# Altium footprint library Power_vac.PcbLib: 50 footprints (part 3 of 4)
Each footprint in its own frame and in the unit in brackets; x right, y up, seen from the top. Pads: shape width x height; smd on the part's side, far side on the other; paste and mask are expansions set on the pad; w line width, h text height; cw(c..) or ccw(c..) is an arc to the next point about the centre after c.
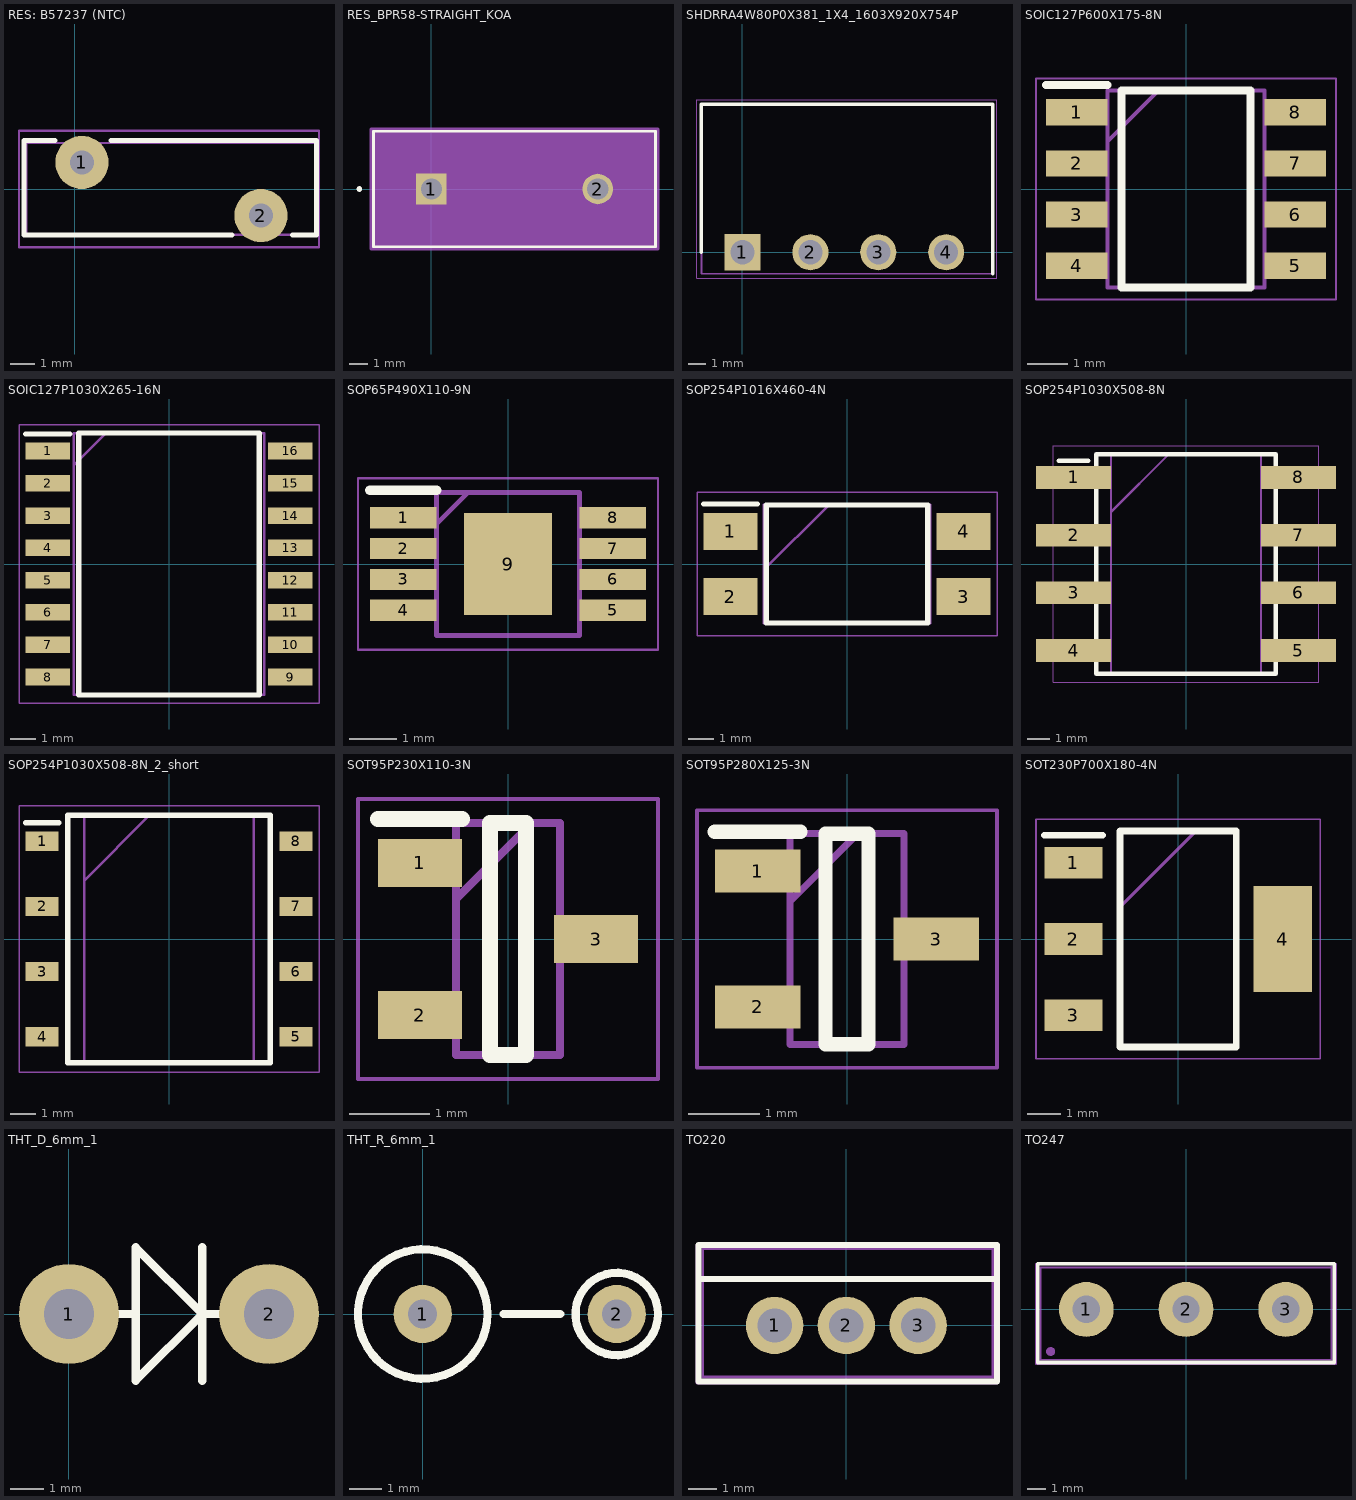
[diagram p2: the footprints below, top view; thin cyan lines are the x and y axes]

## RES: B57237 (NTC) [mm]
pads (2):
  round 2.2 hole 1: 1(0.3,1.1) 2(7.7,-1.1)
Top Overlay:
  lines w0.2: -0.8,2 -2.1,2 -2.1,-1.9 6.5,-1.9 ; 1.5,2 10,2 10,-1.9 9,-1.9
Mechanical 1:
  lines w0.1: -2,-1.9 -2,1.902 10,1.902 10,-1.9 -2,-1.9
Mechanical 15:
  lines w0.1: -2.3,-2.4 10.1,-2.4 10.1,2.4 -2.3,2.4 -2.3,-2.4
3D body "User Library-S10K275.STEP": height 13, standoff -2.5, extent -2,-1.9 10,1.902

## RES_BPR58-STRAIGHT_KOA [mil]
pads (2):
  rect 65x65 hole 45 paste-99999 mask+0: 1(0,0)
  round 65 hole 45 paste-99999 mask+0: 2(354.33,0)
Top Overlay:
  circle w6: c-153.33,0 r3
  lines w6: -123.33,-123 477.67,-123 477.67,123 -123.33,123 -123.33,-123
  text ".Designator" at 39.67,-25 h50
Mechanical 13:
  circle w1: c-98.33,0 r3
  lines w1: -118.33,-118 472.67,-118 472.67,118 -118.33,118 -118.33,-118
  text ".Designator" at 39.67,-25 h50
Mechanical 15:
  region: 482.67,-128 -128.33,-128 -128.33,128 482.67,128
  lines w6: -128.33,-128 -128.33,128 482.67,128 482.67,-128 -128.33,-128
3D body "RES_BPR58-STRAIGHT_KOA.step": height 747.99, standoff -205, extent -118.35,-117.99 472.68,117.99

## SHDRRA4W80P0X381_1X4_1603X920X754P [mm]
pads (4):
  rect 2.025x2.025 hole 1.35: 1(0,0)
  round 2.025 hole 1.35: 2(3.81,0) 3(7.62,0) 4(11.43,0)
Top Overlay:
  lines w0.2: -2.3,0 -2.3,8.3 14.03,8.3 14.03,-1.2
Mechanical 13:
  lines w0.1: -2.3,-1.2 14.03,-1.2 14.03,8.3 -2.3,8.3 -2.3,-1.2
Mechanical 15:
  lines w0.05: -2.55,-1.45 -2.55,8.55 14.28,8.55 14.28,-1.45 -2.55,-1.45
3D body "15EDGRC-3.81-04P-14-00A_H_.stp": height 7.54, standoff -3.7, extent -2.3,-1.2 13.73,8

## SOIC127P600X175-8N [mm]
pads (8):
  rect 1.525x0.65 smd: 1(-2.712,1.905) 2(-2.712,0.635) 3(-2.712,-0.635) 4(-2.712,-1.905) 5(2.712,-1.905) 6(2.712,-0.635) 7(2.712,0.635) 8(2.712,1.905)
Top Overlay:
  lines w0.2: -3.475,2.58 -1.95,2.58 ; -1.6,-2.45 -1.6,2.45 1.6,2.45 1.6,-2.45 -1.6,-2.45
Mechanical 13:
  lines w0.1: -1.95,1.18 -0.68,2.45 ; -1.95,-2.45 -1.95,2.45 1.95,2.45 1.95,-2.45 -1.95,-2.45
Mechanical 15:
  lines w0.05: -3.725,-2.75 -3.725,2.75 3.725,2.75 3.725,-2.75 -3.725,-2.75
3D body "NE555DR.stp": height 1.75, standoff 0, extent -3,-2.45 3,2.45

## SOIC127P1030X265-16N [mm]
pads (16):
  rect 1.75x0.65 smd: 1(-4.775,4.445) 2(-4.775,3.175) 3(-4.775,1.905) 4(-4.775,0.635) 5(-4.775,-0.635) 6(-4.775,-1.905) 7(-4.775,-3.175) 8(-4.775,-4.445) 9(4.775,-4.445) 10(4.775,-3.175) 11(4.775,-1.905) 12(4.775,-0.635) 13(4.775,0.635) 14(4.775,1.905) 15(4.775,3.175) 16(4.775,4.445)
Top Overlay:
  lines w0.2: -5.65,5.12 -3.9,5.12 ; -3.55,-5.15 3.55,-5.15 3.55,5.15 -3.55,5.15 -3.55,-5.15
Mechanical 13:
  lines w0.1: -3.75,3.88 -2.48,5.15 ; -3.75,-5.15 3.75,-5.15 3.75,5.15 -3.75,5.15 -3.75,-5.15
Mechanical 15:
  lines w0.05: -5.9,-5.475 5.9,-5.475 5.9,5.475 -5.9,5.475 -5.9,-5.475
3D body "SG3525A.stp": height 2.65, standoff 0, extent -5.15,-5.15 5.15,5.15

## SOP65P490X110-9N [mm]
pads (9):
  rect 1.4x0.45 smd: 1(-2.2,0.975) 2(-2.2,0.325) 3(-2.2,-0.325) 4(-2.2,-0.975) 5(2.2,-0.975) 6(2.2,-0.325) 7(2.2,0.325) 8(2.2,0.975)
  rect 1.846x2.15 smd: 9(0,0)
Top Overlay:
  lines w0.2: -2.9,1.55 -1.5,1.55
Mechanical 13:
  lines w0.1: -1.5,0.85 -0.85,1.5 ; -1.5,-1.5 1.5,-1.5 1.5,1.5 -1.5,1.5 -1.5,-1.5
Mechanical 15:
  lines w0.05: -3.15,-1.8 3.15,-1.8 3.15,1.8 -3.15,1.8 -3.15,-1.8
3D body "TPA2005D1DGN.stp": height 1.1, standoff 0, extent -2.45,-1.5 2.45,1.5

## SOP254P1016X460-4N [mm]
pads (4):
  rect 2.1x1.45 smd: 1(-4.55,1.27) 2(-4.55,-1.27) 3(4.55,-1.27) 4(4.55,1.27)
Top Overlay:
  lines w0.2: -5.6,2.345 -3.5,2.345 ; -3.15,-2.3 3.15,-2.3 3.15,2.3 -3.15,2.3 -3.15,-2.3
Mechanical 13:
  lines w0.1: -3.25,-0.24 -0.71,2.3 ; -3.25,-2.3 3.25,-2.3 3.25,2.3 -3.25,2.3 -3.25,-2.3
Mechanical 15:
  lines w0.05: -5.85,-2.8 5.85,-2.8 5.85,2.8 -5.85,2.8 -5.85,-2.8
3D body "LTV817S.stp": height 4.6, standoff 0, extent -5.08,-2.297 5.08,2.297

## SOP254P1030X508-8N [mm]
pads (8):
  rect 3.3x1 smd: 1(-4.95,3.81) 2(-4.95,1.27) 3(-4.95,-1.27) 4(-4.95,-3.81) 5(4.95,-3.81) 6(4.95,-1.27) 7(4.95,1.27) 8(4.95,3.81)
Top Overlay:
  lines w0.2: -5.6,4.535 -4.3,4.535 ; -3.95,-4.828 -3.95,4.828 3.95,4.828 3.95,-4.828 -3.95,-4.828
Mechanical 13:
  lines w0.1: -3.302,2.288 -0.762,4.828 ; -3.302,-4.828 -3.302,4.828 3.302,4.828 3.302,-4.828 -3.302,-4.828
Mechanical 15:
  lines w0.05: -5.85,-5.205 -5.85,5.205 5.85,5.205 5.85,-5.205 -5.85,-5.205
3D body "FOD3184SDV.stp": height 5.08, standoff 0, extent -5.15,-4.828 5.15,4.828

## SOP254P1030X508-8N_2_short [mm]
pads (8):
  rect 1.3x0.75 smd: 1(-4.95,3.81) 2(-4.95,1.27) 3(-4.95,-1.27) 4(-4.95,-3.81) 5(4.95,-3.81) 6(4.95,-1.27) 7(4.95,1.27) 8(4.95,3.81)
Top Overlay:
  lines w0.2: -5.6,4.535 -4.3,4.535 ; -3.95,-4.828 3.95,-4.828 3.95,4.828 -3.95,4.828 -3.95,-4.828
Mechanical 13:
  lines w0.1: -3.302,2.288 -0.762,4.828 ; -3.302,-4.828 3.302,-4.828 3.302,4.828 -3.302,4.828 -3.302,-4.828
Mechanical 15:
  lines w0.05: -5.85,-5.205 5.85,-5.205 5.85,5.205 -5.85,5.205 -5.85,-5.205
3D body "FOD3184SDV.stp": height 5.08, standoff 0, extent -5.15,-4.828 5.15,4.828

## SOT95P230X110-3N [mm]
pads (3):
  rect 1.05x0.6 smd: 1(-1.1,0.95) 2(-1.1,-0.95) 3(1.1,0)
Top Overlay:
  lines w0.2: -1.625,1.5 -0.575,1.5 ; -0.225,-1.45 -0.225,1.45 0.225,1.45 0.225,-1.45 -0.225,-1.45
Mechanical 13:
  lines w0.1: -0.65,0.5 0.3,1.45 ; -0.65,-1.45 -0.65,1.45 0.65,1.45 0.65,-1.45 -0.65,-1.45
Mechanical 15:
  lines w0.05: -1.875,-1.75 -1.875,1.75 1.875,1.75 1.875,-1.75 -1.875,-1.75
3D body "TL431MFDT,215.stp": height 0.95, standoff 0, extent -1.201,-1.448 1.199,1.452

## SOT95P280X125-3N [mm]
pads (3):
  rect 1.2x0.6 smd: 1(-1.25,0.95) 2(-1.25,-0.95) 3(1.25,0)
Top Overlay:
  lines w0.2: -1.85,1.5 -0.65,1.5 ; -0.3,-1.475 0.3,-1.475 0.3,1.475 -0.3,1.475 -0.3,-1.475
Mechanical 13:
  lines w0.1: -0.8,0.525 0.15,1.475 ; -0.8,-1.475 0.8,-1.475 0.8,1.475 -0.8,1.475 -0.8,-1.475
Mechanical 15:
  lines w0.05: -2.1,-1.8 2.1,-1.8 2.1,1.8 -2.1,1.8 -2.1,-1.8
3D body "AO3400A.stp": height 1.25, standoff 0, extent -1.4,-1.475 1.4,1.475

## SOT230P700X180-4N [mm]
pads (4):
  rect 1.75x0.95 smd: 1(-3.15,2.3) 2(-3.15,0) 3(-3.15,-2.3)
  rect 1.75x3.2 smd: 4(3.15,0)
Top Overlay:
  lines w0.2: -4.025,3.125 -2.275,3.125 ; -1.75,-3.25 -1.75,3.25 1.75,3.25 1.75,-3.25 -1.75,-3.25
Mechanical 13:
  lines w0.1: -1.75,0.95 0.55,3.25 ; -1.75,-3.25 -1.75,3.25 1.75,3.25 1.75,-3.25 -1.75,-3.25
Mechanical 15:
  lines w0.05: -4.275,-3.6 -4.275,3.6 4.275,3.6 4.275,-3.6 -4.275,-3.6
3D body "LM317_SOT-223_.stp": height 1.8, standoff 0, extent -3.5,-3.25 3.5,3.25

## THT_D_6mm_1 [mm]
pads (2):
  round 3 hole 1.5: 1(0,0) 2(6,0)
Top Overlay:
  lines w0.254: 1.5,0 2,0 ; 4,-2 4,2 ; 4.5,0 4,0 ; 2,0 2,-2 4,0 ; 2,0 2,1.5 2,2 4,0

## THT_R_6mm_1 [mm]
pads (2):
  round 1.8 hole 0.9: 1(0,0) 2(6,0)
Top Overlay:
  circle w0.254: c0,0 r2
  circle w0.254: c6,0 r1.275
  lines w0.254: 2.5,0 4.25,0

## TO220 [mm]
height 22
pads (3):
  round 2 hole 1.2: 1(-2.5,0) 2(0,0) 3(2.5,0)
Top Overlay:
  lines w0.2: -5.15,1.619 5.247,1.619 ; -5.15,-1.95 -5.15,2.8 5.247,2.8 5.247,-1.95 -5.15,-1.95
Mechanical 1:
  lines w0.1: -5,1.6 5.1,1.6 ; -5,-1.8 5.1,-1.8 5.1,2.675 -5,2.675 -5,-1.8
Mechanical 15:
  lines w0.1: -0.5,0 0.5,0 ; 0,-0.5 0,0.5 ; -5.2,-2 -5.2,2.8 5.247,2.8 5.247,-2 -5.2,-2
3D body "User Library-TO-220-4.STEP": height 22.06, standoff -6.74, extent -5,-1.8 5.2,2.7

## TO247 [mm] "3-Lead Plastic TO-247"
height 20
pads (4):
  round 3 hole 1.5: 1(-5.45,0) 2(0,0) 3(5.45,0)
  round 0.5 on Mech1: ""(-7.4,-2.3)
Top Overlay:
  lines w0.2: -8.1,-2.9 8.1,-2.9 8.1,2.5 -8.1,2.5 -8.1,-2.9
Mechanical 1:
  lines w0.1: -7.95,2.3 7.9,2.3 7.95,2.35 7.95,-2.75 -7.95,-2.75 -7.95,2.3 ; -7.95,2.3 -7.95,2.3
Mechanical 15:
  lines w0.1: -0.5,0 0.5,0 ; 0,-0.5 0,0.5 ; -8.2,-3 -8.2,2.5 8.2,2.5 8.2,-3 -8.2,-3
3D body "TO247_3_21.STEP": height 26.95, standoff -2.47, extent -7.95,-2.75 7.95,2.35